# Altium schematic symbol library MAX3232ECAE-T.SchLib: 1 symbol
Pins are listed as number, name and electrical type; pins without a type are passive.

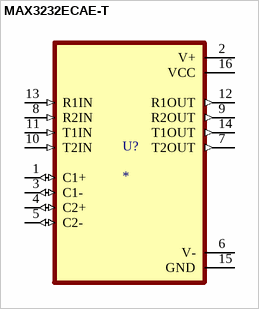
[diagram p0: symbol MAX3232ECAE-T]

## MAX3232ECAE-T
designator U?
Â±15kV ESD-Protected, Down to 10nA, 3.0V to 5.5V, Up to 1Mbps, True RS-232 Transceivers; MF: Analog Devices; MP: MAX3232ECAE+T; SnapEDA_Link: https://www.snapeda.com/parts/MAX3232ECAE+T/Analog+Devices/view-part/?ref=snap; Package: SSOP-16 Maxim; Value: *; Check_prices: https://www.snapeda.com/parts/MAX3232ECAE+T/Analog+Devices/view-part/?ref=eda
footprint SOP65P777X199-16N
pins: 1 C1+ (io), 2 V+ (power), 3 C1- (io), 4 C2+ (io), 5 C2- (io), 6 V- (power), 7 T2OUT (out), 8 R2IN (in), 9 R2OUT (out), 10 T2IN (in), 11 T1IN (in), 12 R1OUT (out), 13 R1IN (in), 14 T1OUT (out), 15 GND (power), 16 VCC (power)